# Altium footprint library Components - 26.10.26 - 21.23.PcbLib: 1 footprints
Each footprint in its own frame and in the unit in brackets; x right, y up, seen from the top. Pads: shape width x height; smd on the part's side, far side on the other; paste and mask are expansions set on the pad; w line width, h text height; cw(c..) or ccw(c..) is an arc to the next point about the centre after c.
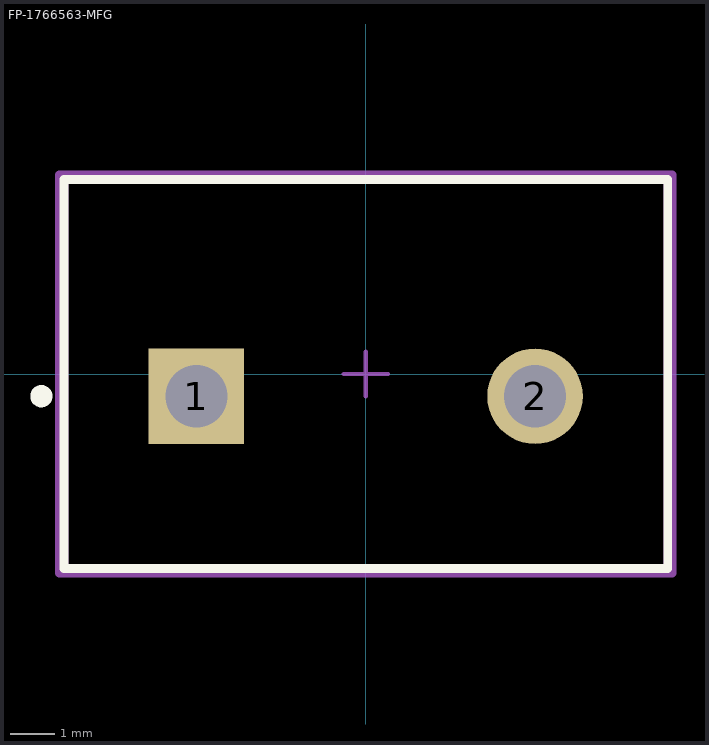
[diagram p0: the footprint, top view; thin cyan lines are the x and y axes]

## FP-1766563-MFG [mm]
pads (2):
  rect 2.15x2.15 hole 1.4 paste-2539.97 mask+0: 1(-3.81,-0.5)
  round 2.15 hole 1.4 paste-2539.97 mask+0: 2(3.81,-0.5)
Top Overlay:
  circle w0.25: c-7.3,-0.5 r0.125
  lines w0.2: -6.795,-4.375 -6.795,4.375 6.795,4.375 6.795,-4.375 -6.795,-4.375
Top Assembly:
  lines w0.2: -6.895,-4.475 -6.895,4.475 6.895,4.475 6.895,-4.475 -6.895,-4.475
  text ".Designator" at 0,0.188 h1
Top 3D Body:
  lines w0.2: -6.795,-4.375 -6.795,4.375 6.795,4.375 6.795,-4.375 -6.795,-4.375
Top Courtyard:
  lines w0.2: -6.895,-4.475 -6.895,4.475 6.895,4.475 6.895,-4.475 -6.895,-4.475
Top Component Center:
  lines w0.1: -0.5,0 0.5,0 ; 0,-0.5 0,0.5
3D body "Conn_Phoenix_Contact_1766563_eec.STEP": height 0.25, standoff 0, extent -6.895,-4.475 6.895,4.475